# Altium footprint library 后改2025底板线路板图.PcbLib: 53 footprints (part 3 of 4)
Each footprint in its own frame and in the unit in brackets; x right, y up, seen from the top. Pads: shape width x height; smd on the part's side, far side on the other; paste and mask are expansions set on the pad; w line width, h text height; cw(c..) or ccw(c..) is an arc to the next point about the centre after c.
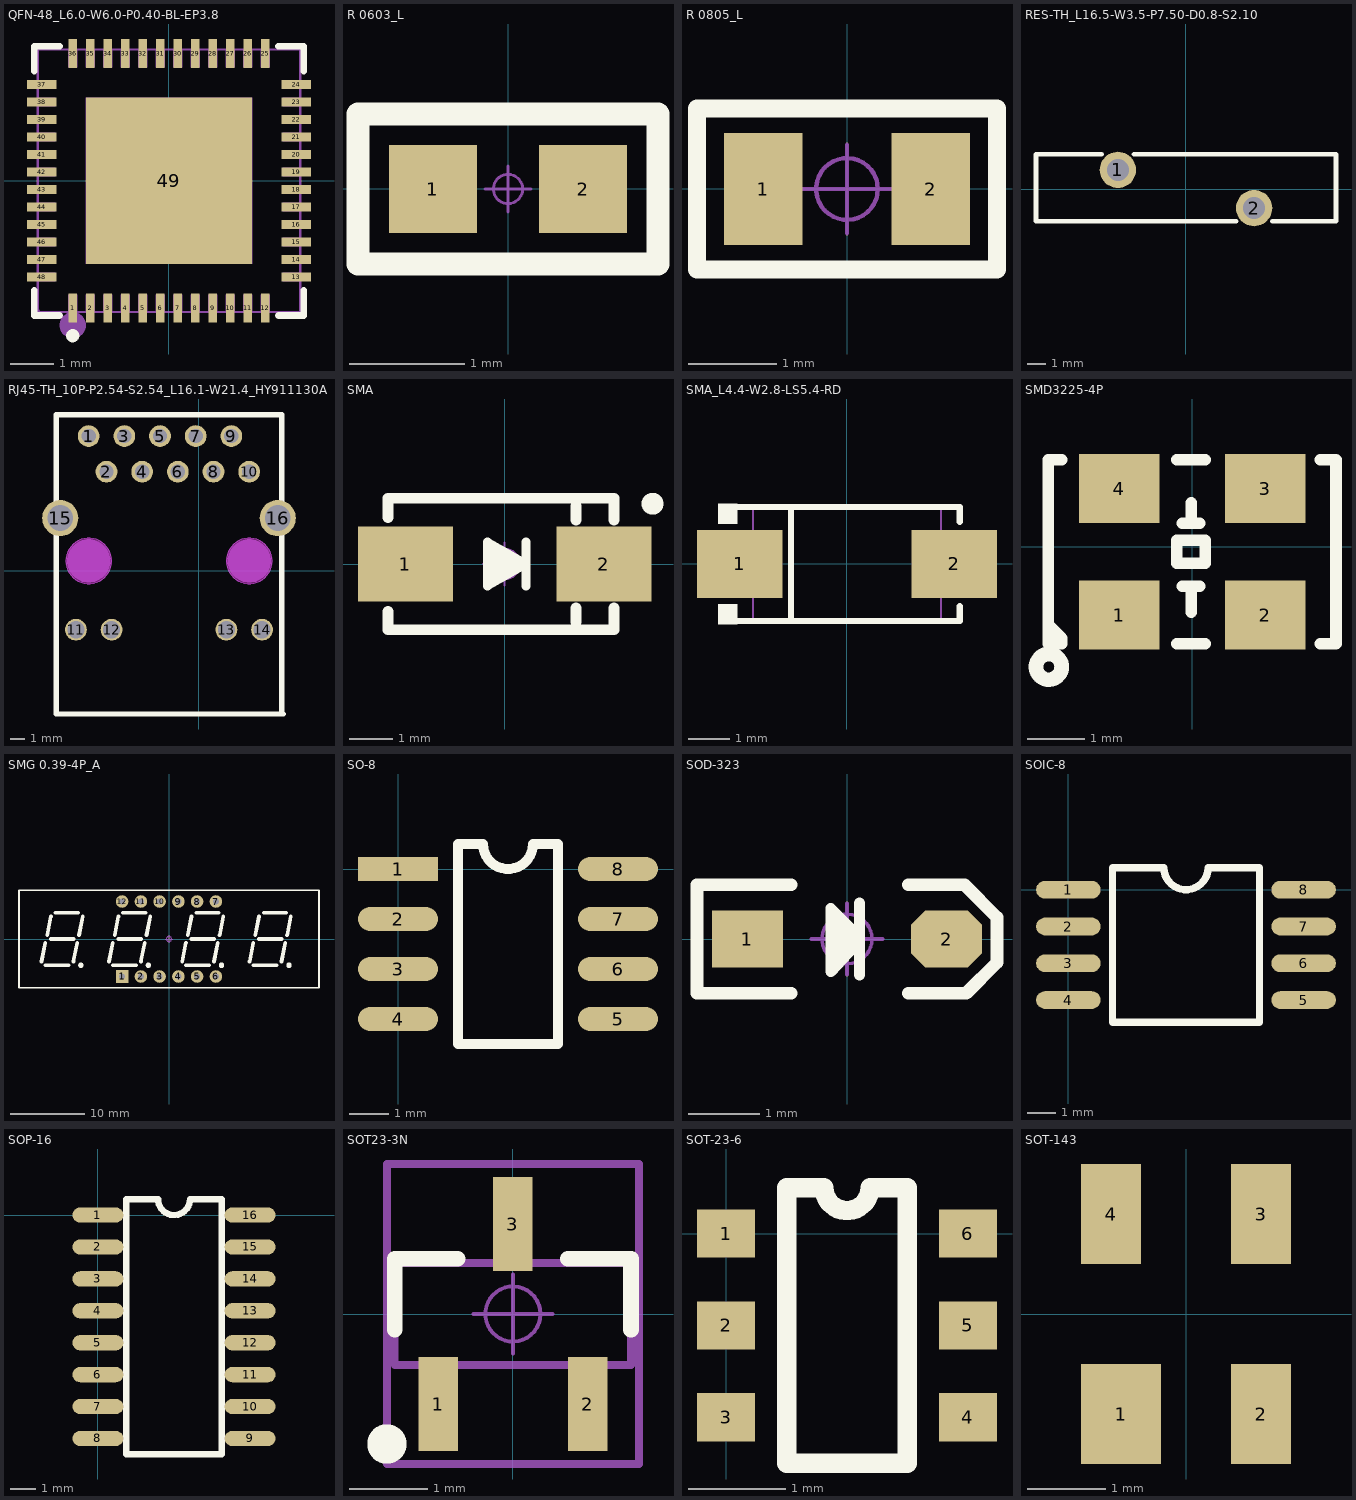
[diagram p2: the footprints below, top view; thin cyan lines are the x and y axes]

## QFN-48_L6.0-W6.0-P0.40-BL-EP3.8 [mm]
pads (49):
  rect 0.2x0.665 smd paste-100 mask+0.051: 1(-2.2,-2.908) 2(-1.8,-2.908) 3(-1.4,-2.908) 4(-1,-2.908) 5(-0.6,-2.908) 6(-0.2,-2.908) 7(0.2,-2.908) 8(0.6,-2.908) 9(1,-2.908) 10(1.4,-2.908) 11(1.8,-2.908) 12(2.2,-2.908) 25(2.2,2.908) 26(1.8,2.908) 27(1.4,2.908) 28(1,2.908) 29(0.6,2.908) 30(0.2,2.908) 31(-0.2,2.908) 32(-0.6,2.908) 33(-1,2.908) 34(-1.4,2.908) 35(-1.8,2.908) 36(-2.2,2.908)
  rect 0.665x0.2 smd paste-100 mask+0.051: 13(2.908,-2.2) 14(2.908,-1.8) 15(2.908,-1.4) 16(2.908,-1) 17(2.908,-0.6) 18(2.908,-0.2) 19(2.908,0.2) 20(2.908,0.6) 21(2.908,1) 22(2.908,1.4) 23(2.908,1.8) 24(2.908,2.2) 37(-2.908,2.2) 38(-2.908,1.8) 39(-2.908,1.4) 40(-2.908,1) 41(-2.908,0.6) 42(-2.908,0.2) 43(-2.908,-0.2) 44(-2.908,-0.6) 45(-2.908,-1) 46(-2.908,-1.4) 47(-2.908,-1.8) 48(-2.908,-2.2)
  rect 3.8x3.8 smd paste-100 mask+0.051: 49(0,0)
Top Overlay:
  circle w0.15: c-2.2,-3.54 r0.075
  lines w0.152: -3.076,-2.503 -3.076,-3.076 -2.503,-3.076 ; -3.076,2.503 -3.076,3.076 -2.503,3.076 ; 2.503,-3.076 3.076,-3.076 3.076,-2.503 ; 2.503,3.076 3.076,3.076 3.076,2.503
Top Paste:
  drawing of 49 lines, arcs and shapes, not listed
Mechanical 6:
  circle w0.3: c-2.2,-3.3 r0.15
Mechanical 15:
  drawing of 54 lines, arcs and shapes, not listed

## R 0603_L [mil] "1/10W贴片电阻                 淘宝ID:黄晶宝石"
pads (2):
  rect 30x30 smd: 1(-25.59,0) 2(25.59,0)
Top Overlay:
  lines w8: -51.18,-25.59 51.18,-25.59 51.18,25.59 -51.18,25.59 -51.18,-25.59
Mechanical 15:
  circle w1: c0,0 r5
  lines w1: -7.87,0 7.87,0 ; 0,-7.87 0,7.87
3D body "R 0603.STEP": height 15.79, standoff -0.13, extent -31.49,-15.74 31.5,15.75

## R 0805_L [mil] "1/8W贴片电阻"
pads (2):
  rect 35x50 smd: 1(-37.4,0) 2(37.4,0)
Top Overlay:
  lines w8: -66.93,-36 -66.93,36 66.93,36 66.93,-36 -66.93,-36
Mechanical 15:
  circle w1.97: c0,0 r13.78
  lines w1.97: -19.68,0 19.68,0 ; 0,-19.68 0,19.68
3D body "R 0805.STEP": height 19.72, standoff -0.24, extent -39.37,-24.6 39.37,24.61

## RES-TH_L16.5-W3.5-P7.50-D0.8-S2.10 [mm]
pads (2):
  round 2 hole 1.2: 1(-3.749,1.05) 2(3.749,-1.05)
Top Overlay:
  lines w0.254: -4.634,1.905 -8.255,1.905 -8.255,-1.778 2.757,-1.778 ; -2.864,1.905 8.255,1.905 8.255,-1.778 4.741,-1.778

## RJ45-TH_10P-P2.54-S2.54_L16.1-W21.4_HY911130A [mil]
pads (16):
  round 61 hole 40: 1(-308.48,377.48) 2(-258.48,277.48) 3(-208.48,377.48) 4(-158.48,277.48) 5(-108.48,377.48) 6(-58.48,277.48) 7(-8.48,377.48) 8(41.52,277.48) 9(91.52,377.48) 10(141.52,277.48)
  round 61 hole 48: 11(-344.11,-165.44) 12(-244.11,-165.44) 13(77.55,-165.44) 14(177.55,-165.44)
  round 101.6 hole 72: 15(-388.2,147.55) 16(221.64,147.55)
Top Overlay:
  lines w15.24: 232.46,-401.66 232.46,436.92 -399.03,436.92 -399.03,-401.66 236.74,-401.66
Keep-Out Layer:
  board cut-out: -244.31,27.48 -244.31,21.17 -246.77,8.81 -251.59,-2.83 -258.59,-13.31 -267.5,-22.22 -277.98,-29.22 -289.62,-34.04 -301.98,-36.5 -314.59,-36.5 -326.95,-34.04 -338.59,-29.22 -349.07,-22.22 -357.98,-13.31 -364.98,-2.83 -369.8,8.81 -372.26,21.17 -372.26,27.48 -372.26,33.78 -369.8,46.14 -364.98,57.78 -357.98,68.26 -349.07,77.17 -338.59,84.17 -326.95,88.99 -314.59,91.45 -301.98,91.45 -289.62,88.99 -277.98,84.17 -267.5,77.17 -258.59,68.26 -251.59,57.78 -246.77,46.14 -244.31,33.78
  board cut-out: 205.69,27.48 205.69,21.17 203.23,8.81 198.41,-2.83 191.41,-13.31 182.5,-22.22 172.02,-29.22 160.38,-34.04 148.02,-36.5 135.41,-36.5 123.05,-34.04 111.41,-29.22 100.93,-22.22 92.02,-13.31 85.02,-2.83 80.2,8.81 77.74,21.17 77.74,27.48 77.74,33.78 80.2,46.14 85.02,57.78 92.02,68.26 100.93,77.17 111.41,84.17 123.05,88.99 135.41,91.45 148.02,91.45 160.38,88.99 172.02,84.17 182.5,77.17 191.41,68.26 198.41,57.78 203.23,46.14 205.69,33.78
Keep-Out Layer:
  circle w1: c-308.28,27.48 r63.98
  circle w1: c141.72,27.48 r63.98
  region: -244.31,27.48 -244.31,21.17 -246.77,8.81 -251.59,-2.83 -258.59,-13.31 -267.5,-22.22 -277.98,-29.22 -289.62,-34.04 -301.98,-36.5 -314.59,-36.5 -326.95,-34.04 -338.59,-29.22 -349.07,-22.22 -357.98,-13.31 -364.98,-2.83 -369.8,8.81 -372.26,21.17 -372.26,27.48 -372.26,33.78 -369.8,46.14 -364.98,57.78 -357.98,68.26 -349.07,77.17 -338.59,84.17 -326.95,88.99 -314.59,91.45 -301.98,91.45 -289.62,88.99 -277.98,84.17 -267.5,77.17 -258.59,68.26 -251.59,57.78 -246.77,46.14 -244.31,33.78
  region: 205.69,27.48 205.69,21.17 203.23,8.81 198.41,-2.83 191.41,-13.31 182.5,-22.22 172.02,-29.22 160.38,-34.04 148.02,-36.5 135.41,-36.5 123.05,-34.04 111.41,-29.22 100.93,-22.22 92.02,-13.31 85.02,-2.83 80.2,8.81 77.74,21.17 77.74,27.48 77.74,33.78 80.2,46.14 85.02,57.78 92.02,68.26 100.93,77.17 111.41,84.17 123.05,88.99 135.41,91.45 148.02,91.45 160.38,88.99 172.02,84.17 182.5,77.17 191.41,68.26 198.41,57.78 203.23,46.14 205.69,33.78
Mechanical 1:
  circle w1: c-308.28,27.48 r63.98
  circle w1: c141.72,27.48 r63.98
Mechanical 15:
  drawing of 23 lines, arcs and shapes, not listed

## SMA [mm] "4.5x2.6*2.2mm（长宽高，不包括引脚）"
height 2.54
pads (2):
  rect 2.2x1.75 smd: 1(-2.3,0) 2(2.3,0)
Top Overlay:
  circle w0.254: c3.429,1.397 r0.127
  lines w0.203: 0.494,-0.508 0.494,0.508 ; -0.395,-0.508 0.494,0 -0.395,0.508 -0.395,-0.508
  lines w0.254: -2.7,-1.105 -2.7,-1.524 2.54,-1.524 2.54,-1.016 ; -2.7,1.08 -2.7,1.524 2.54,1.524 2.54,1.016 ; -0.33,0.305 0.305,0 -0.254,-0.305 -0.254,0.051 0.023,0 ; 1.651,-1.35 1.651,-1.016 ; 1.651,1.016 1.651,1.35
Mechanical 15:
  circle w0.05: c0,0 r0.35
  lines w0.05: -0.5,0 0.5,0 ; 0,-0.5 0,0.5
3D body "SMA.STEP": height 2.15, standoff 0.04, extent -2.528,-1.3 2.575,1.3

## SMA_L4.4-W2.8-LS5.4-RD [mm]
pads (2):
  rect 2.046x1.62 smd paste+0 mask+0.051: 1(-2.565,0) 2(2.565,0)
Top Overlay:
  region: -2.625,1.44 -2.625,0.962 -3.082,0.962 -3.082,1.44
  region: -2.625,-1.44 -2.625,-0.962 -3.082,-0.962 -3.082,-1.44
  lines w0.152: -2.701,-1.364 2.701,-1.364 2.701,-1.013 ; -2.701,1.364 2.701,1.364 2.701,1.013 ; -1.339,-1.364 -1.339,1.364
Mechanical 6:
  region: -2.432,-0.097 -2.432,0.097 -1.659,0.097 -1.659,-0.097
  region: 2.432,-0.097 2.432,0.097 1.659,0.097 1.659,-0.097
  region: 2.142,-0.644 2.142,0.644 1.949,0.644 1.949,-0.644
Mechanical 15:
  region: -2.74,-1.375 -2.74,-1.35 -2.775,-1.315 -2.825,-1.315 -2.86,-1.35 -2.86,-1.375 -2.86,-1.4 -2.825,-1.435 -2.775,-1.435 -2.74,-1.4 -2.74,-1.375
  region: -2.8,-0.725 -2.8,0.725 -1.65,0.725 -1.65,-0.725
  region: 2.809,0.725 2.809,-0.725 1.659,-0.725 1.659,0.725
  lines w0.051: -2.25,-1.375 -2.25,1.375 2.25,1.375 2.25,-1.375 -2.25,-1.375

## SMD3225-4P [mm]
pads (4):
  rect 1.4x1.2 smd: 1(-1.27,-1.184) 2(1.27,-1.184) 3(1.27,1.016) 4(-1.27,1.016)
Top Overlay:
  circle w0.254: c-2.494,-2.084 r0.224
  lines w0.2: -2.47,-1.384 -2.27,-1.584 -2.27,-1.684 -2.5,-1.684 -2.5,1.516 -2.27,1.516 ; -0.27,-1.684 0.23,-1.684 ; -0.27,1.516 0.23,1.516 ; -0.17,-0.684 0.13,-0.684 ; -0.17,0.416 0.13,0.416 ; -0.02,-1.134 -0.02,-0.684 ; -0.02,0.416 -0.02,0.766 ; 2.23,-1.684 2.5,-1.684 2.5,1.516 2.23,1.516 ; -0.27,-0.284 0.23,-0.284 0.23,0.116 -0.27,0.116 -0.27,-0.284

## SMG 0.39-4P_A [mm] "40.2*13*7mm(长宽厚)"
pads (12):
  rect 1.7x1.7 hole 0.8: 1(-6.35,-5.08)
  round 1.7 hole 0.8: 2(-3.81,-5.08) 3(-1.27,-5.08) 4(1.27,-5.08) 5(3.81,-5.08) 6(6.35,-5.08) 7(6.35,5.08) 8(3.81,5.08) 9(1.27,5.08) 10(-1.27,5.08) 11(-3.81,5.08) 12(-6.35,5.08)
Top Overlay:
  circle w0.381: c7.112,-3.556 r0.18
  circle w0.381: c16.256,-3.556 r0.18
  circle w0.381: c-11.938,-3.556 r0.18
  circle w0.381: c-2.794,-3.556 r0.18
  lines w0.254: -20.32,-6.604 20.32,-6.604 20.32,6.604 -20.32,6.604 -20.32,-6.604
  lines w0.508: -17.272,-3.048 -16.764,-0.508 ; -16.764,-3.556 -13.589,-3.556 ; -16.51,0.508 -16.002,3.048 ; -16.002,0 -12.954,0 ; -15.367,3.556 -12.319,3.556 ; -12.954,-3.048 -12.446,-0.508 ; -12.192,0.508 -11.684,3.048 ; -8.128,-3.048 -7.62,-0.508 ; -7.62,-3.556 -4.445,-3.556 ; -7.366,0.508 -6.858,3.048 ; -6.223,3.556 -3.175,3.556 ; -3.81,-3.048 -3.302,-0.508 ; -3.048,0.508 -2.54,3.048 ; 1.778,-3.048 2.286,-0.508 ; 2.286,-3.556 5.461,-3.556 ; 2.54,0.508 3.048,3.048 ; 3.048,0 6.096,0 ; 3.683,3.556 6.731,3.556 ; 6.096,-3.048 6.604,-0.508 ; 6.858,0.508 7.366,3.048 ; 10.922,-3.048 11.43,-0.508 ; 11.43,-3.556 14.605,-3.556 ; 11.684,0.508 12.192,3.048 ; 12.827,3.556 15.875,3.556 ; 15.24,-3.048 15.748,-0.508 ; 16.002,0.508 16.51,3.048 ; -6.858,0 -3.81,0 -6.858,0 ; 12.192,0 15.24,0 12.192,0
Mechanical 15:
  circle w0.05: c0,0 r0.35
  lines w0.05: -0.5,0 0.5,0 ; 0,-0.5 0,0.5
3D body "SMG 0.39-4P_A.STEP": height 7, standoff -3.6, extent -20.09,-6.5 20.09,6.5

## SO-8 [mil] "封装库来自淘宝卖家 ID：黄晶宝石"
pads (8):
  rect 80x24 smd: 1(0,0)
  oval 80x24 smd: 2(0,-50) 3(0,-100) 4(0,-150) 5(220,-150) 6(220,-100) 7(220,-50) 8(220,0)
Top Overlay:
  lines w10: 60,-175 60,25 85,25 ccw(c110,25) 135,25 160,25 160,-175 60,-175

## SOD-323 [mm] "1.8x1.3X0.9mm（长宽高，不包括引脚）"
pads (2):
  rect 1x0.8 smd: 1(-1.4,0)
  oct 1x0.8 smd: 2(1.4,0)
Top Overlay:
  lines w0.152: 0.178,-0.508 0.178,0.508 ; 0.178,-0.025 -0.229,-0.457 -0.229,0.432 0.178,0.025
  lines w0.178: -0.787,-0.762 -2.108,-0.762 -2.108,0.762 -0.787,0.762 ; 0.864,-0.762 1.676,-0.762 2.108,-0.33 2.108,0.305 1.651,0.762 0.864,0.762
  lines w0.254: -0.127,0.254 -0.152,-0.178 0.025,-0.025 -0.025,0.127
Mechanical 15:
  circle w0.05: c0,0 r0.35
  lines w0.05: -0.5,0 0.5,0 ; 0,-0.5 0,0.5
3D body "SOD-323.STEP": height 1, standoff 0.04, extent -1.337,-0.631 1.311,0.669

## SOIC-8 [mil]
pads (8):
  oval 88x24 smd: 1(0,0) 2(0,-50) 3(0,-100) 4(0,-150) 5(320,-150) 6(320,-100) 7(320,-50) 8(320,0)
Top Overlay:
  lines w10: 60,-180 60,30 130,30 ccw(c160,30) 190,30 260,30 260,-180 60,-180
3D body "SW3dPS-SOIC8_(ATTINY12).STEP": height 90.55, standoff -0.78, extent -5.2,-180.9 325.21,30.91

## SOP-16 [mil] "淘宝ID:黄晶宝石"
pads (16):
  oval 80x24 smd: 1(0,0) 2(0,-50) 3(0,-100) 4(0,-150) 5(0,-200) 6(0,-250) 7(0,-300) 8(0,-350) 9(238.5,-350) 10(238.5,-300) 11(238.5,-250) 12(238.5,-200) 13(238.5,-150) 14(238.5,-100) 15(238.5,-50) 16(238.5,0)
Top Overlay:
  lines w10: 44.25,-375 194.25,-375 194.25,25 144.25,25 cw(c119.25,25) 94.25,25 44.25,25 44.25,-375

## SOT23-3N [mm] "3x1.3x1mm(长宽高)    封装库来自淘宝卖家 ID：黄晶宝石"
height 1.1
pads (3):
  rect 0.5x1.2 smd: 1(-0.95,-1.143) 2(0.95,-1.143) 3(0,1.143)
Top Overlay:
  circle w0.25: c-1.6,-1.651 r0.125
  lines w0.2: -1.501,-0.2 -1.501,0.7 -0.701,0.7 ; 0.699,0.7 1.499,0.7 1.499,-0.2
Mechanical 13:
  lines w0.1: -1.5,-0.65 1.5,-0.65 1.5,0.65 -1.5,0.65 -1.5,-0.65
Mechanical 15:
  circle w0.05: c0,0 r0.35
  lines w0.05: -0.5,0 0.5,0 ; 0,-0.5 0,0.5
  lines w0.1: -1.6,-1.905 1.6,-1.905 1.6,1.905 -1.6,1.905 -1.6,-1.905
3D body "SOT23-3.STEP": height 1.05, standoff 0, extent -1.5,-1.2 1.5,1.2

## SOT-23-6 [mm] "淘宝ID:黄晶宝石"
pads (6):
  rect 0.6x0.5 smd: 1(0,0) 2(0,-0.95) 3(0,-1.9) 4(2.5,-1.9) 5(2.5,-0.95) 6(2.5,0)
Top Overlay:
  lines w0.2: 0.627,-2.375 0.627,0.475 1.012,0.475 ccw(c1.25,0.475) 1.488,0.475 1.873,0.475 1.873,-2.375 0.627,-2.375

## SOT-143 [mil]
pads (4):
  rect 40x50 smd: 1(-32.5,-50)
  rect 30x50 smd: 2(37.5,-50) 3(37.5,50) 4(-37.5,50)